# Altium schematic symbol library Discretes.SchLib: 1 symbol
Pins are listed as number, name and electrical type; pins without a type are passive.

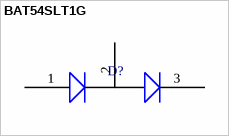
[diagram p0: symbol BAT54SLT1G]

## BAT54SLT1G
designator D?
pins: 1 A, 2 A/C, 3 C